# EAGLE library part NUCLEO-F446RE (library moto-edge-hil)
NUCLEO-F446RE STM32F446RE Nucleo-64 (HIL simulator). ST morpho CN7/CN10 (UM1724). Kart: 70.0 x 82.5 mm - Guven: M STEP: st.com NUCLEO-F446RE STEP / GrabCAD 'Nucleo-64' NOT: Arduino headerlari (CN5/6/8/9) morpho ile ayni sinyaller oldugu icin eklenmedi. X/Y yaklasik.
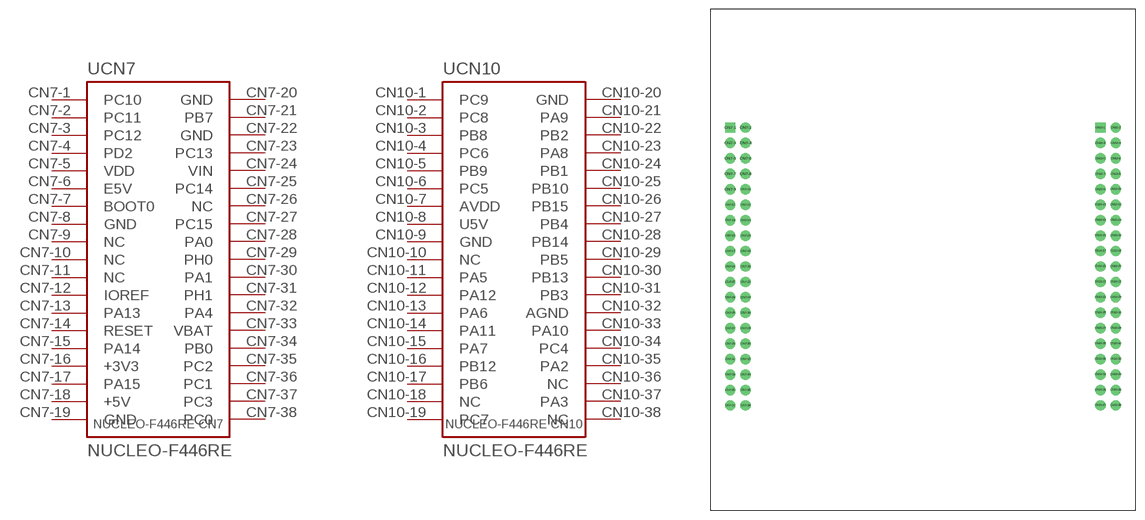
[diagram p2: symbol with the pads of NUCLEO-F446RE; footprint NUCLEO-F446RE]

Designator prefix U; gates CN7=NUCLEO-F446RE_CN7 CN10=NUCLEO-F446RE_CN10

## NUCLEO-F446RE (BOARD_SIZE: 70.0x82.5mm; CONFIDENCE: M)  [NUCLEO-F446RE]
CN7-1  CN7:PC10  pas
CN7-2  CN7:PC11  pas
CN7-3  CN7:PC12  pas
CN7-4  CN7:PD2  pas
CN7-5  CN7:VDD  pas
CN7-6  CN7:E5V  pas
CN7-7  CN7:BOOT0  pas
CN7-8  CN7:GND  pas
CN7-9  CN7:NC  pas
CN7-10  CN7:NC  pas
CN7-11  CN7:NC  pas
CN7-12  CN7:IOREF  pas
CN7-13  CN7:PA13  pas
CN7-14  CN7:RESET  pas
CN7-15  CN7:PA14  pas
CN7-16  CN7:+3V3  pas
CN7-17  CN7:PA15  pas
CN7-18  CN7:+5V  pas
CN7-19  CN7:GND  pas
CN7-20  CN7:GND  pas
CN7-21  CN7:PB7  pas
CN7-22  CN7:GND  pas
CN7-23  CN7:PC13  pas
CN7-24  CN7:VIN  pas
CN7-25  CN7:PC14  pas
CN7-26  CN7:NC  pas
CN7-27  CN7:PC15  pas
CN7-28  CN7:PA0  pas
CN7-29  CN7:PH0  pas
CN7-30  CN7:PA1  pas
CN7-31  CN7:PH1  pas
CN7-32  CN7:PA4  pas
CN7-33  CN7:VBAT  pas
CN7-34  CN7:PB0  pas
CN7-35  CN7:PC2  pas
CN7-36  CN7:PC1  pas
CN7-37  CN7:PC3  pas
CN7-38  CN7:PC0  pas
CN10-1  CN10:PC9  pas
CN10-2  CN10:PC8  pas
CN10-3  CN10:PB8  pas
CN10-4  CN10:PC6  pas
CN10-5  CN10:PB9  pas
CN10-6  CN10:PC5  pas
CN10-7  CN10:AVDD  pas
CN10-8  CN10:U5V  pas
CN10-9  CN10:GND  pas
CN10-10  CN10:NC  pas
CN10-11  CN10:PA5  pas
CN10-12  CN10:PA12  pas
CN10-13  CN10:PA6  pas
CN10-14  CN10:PA11  pas
CN10-15  CN10:PA7  pas
CN10-16  CN10:PB12  pas
CN10-17  CN10:PB6  pas
CN10-18  CN10:NC  pas
CN10-19  CN10:PC7  pas
CN10-20  CN10:GND  pas
CN10-21  CN10:PA9  pas
CN10-22  CN10:PB2  pas
CN10-23  CN10:PA8  pas
CN10-24  CN10:PB1  pas
CN10-25  CN10:PB10  pas
CN10-26  CN10:PB15  pas
CN10-27  CN10:PB4  pas
CN10-28  CN10:PB14  pas
CN10-29  CN10:PB5  pas
CN10-30  CN10:PB13  pas
CN10-31  CN10:PB3  pas
CN10-32  CN10:AGND  pas
CN10-33  CN10:PA10  pas
CN10-34  CN10:PC4  pas
CN10-35  CN10:PA2  pas
CN10-36  CN10:NC  pas
CN10-37  CN10:PA3  pas
CN10-38  CN10:NC  pas

## Footprint NUCLEO-F446RE (pad centres in mm)
STM32F446RE Nucleo-64 (HIL simulator). ST morpho CN7/CN10 (UM1724). | Kart: 70.0 x 82.5 mm | Guven: M
drill 1 pad 1.7 square: CN7-1 -31.7,21.75; CN10-1 29.16,21.75
drill 1 pad 1.7 round: CN7-2 -29.16,21.75; CN7-3 -31.7,19.21; CN7-4 -29.16,19.21; CN7-5 -31.7,16.67; CN7-6 -29.16,16.67; CN7-7 -31.7,14.13; CN7-8 -29.16,14.13; CN7-9 -31.7,11.59; CN7-10 -29.16,11.59; CN7-11 -31.7,9.05; CN7-12 -29.16,9.05; CN7-13 -31.7,6.51; CN7-14 -29.16,6.51; CN7-15 -31.7,3.97; CN7-16 -29.16,3.97; CN7-17 -31.7,1.43; CN7-18 -29.16,1.43; CN7-19 -31.7,-1.11; CN7-20 -29.16,-1.11; CN7-21 -31.7,-3.65; CN7-22 -29.16,-3.65; CN7-23 -31.7,-6.19; CN7-24 -29.16,-6.19; CN7-25 -31.7,-8.73; CN7-26 -29.16,-8.73; CN7-27 -31.7,-11.27; CN7-28 -29.16,-11.27; CN7-29 -31.7,-13.81; CN7-30 -29.16,-13.81; CN7-31 -31.7,-16.35; CN7-32 -29.16,-16.35; CN7-33 -31.7,-18.89; CN7-34 -29.16,-18.89; CN7-35 -31.7,-21.43; CN7-36 -29.16,-21.43; CN7-37 -31.7,-23.97; CN7-38 -29.16,-23.97; CN10-2 31.7,21.75; CN10-3 29.16,19.21; CN10-4 31.7,19.21; CN10-5 29.16,16.67; CN10-6 31.7,16.67; CN10-7 29.16,14.13; CN10-8 31.7,14.13; CN10-9 29.16,11.59; CN10-10 31.7,11.59; CN10-11 29.16,9.05; CN10-12 31.7,9.05; CN10-13 29.16,6.51; CN10-14 31.7,6.51; CN10-15 29.16,3.97; CN10-16 31.7,3.97; CN10-17 29.16,1.43; CN10-18 31.7,1.43; CN10-19 29.16,-1.11; CN10-20 31.7,-1.11; CN10-21 29.16,-3.65; CN10-22 31.7,-3.65; CN10-23 29.16,-6.19; CN10-24 31.7,-6.19; CN10-25 29.16,-8.73; CN10-26 31.7,-8.73; CN10-27 29.16,-11.27; CN10-28 31.7,-11.27; CN10-29 29.16,-13.81; CN10-30 31.7,-13.81; CN10-31 29.16,-16.35; CN10-32 31.7,-16.35; CN10-33 29.16,-18.89; CN10-34 31.7,-18.89; CN10-35 29.16,-21.43; CN10-36 31.7,-21.43; CN10-37 29.16,-23.97; CN10-38 31.7,-23.97